# Altium schematic symbol library UCP.SchLib: 378 symbols (part 12 of 14)
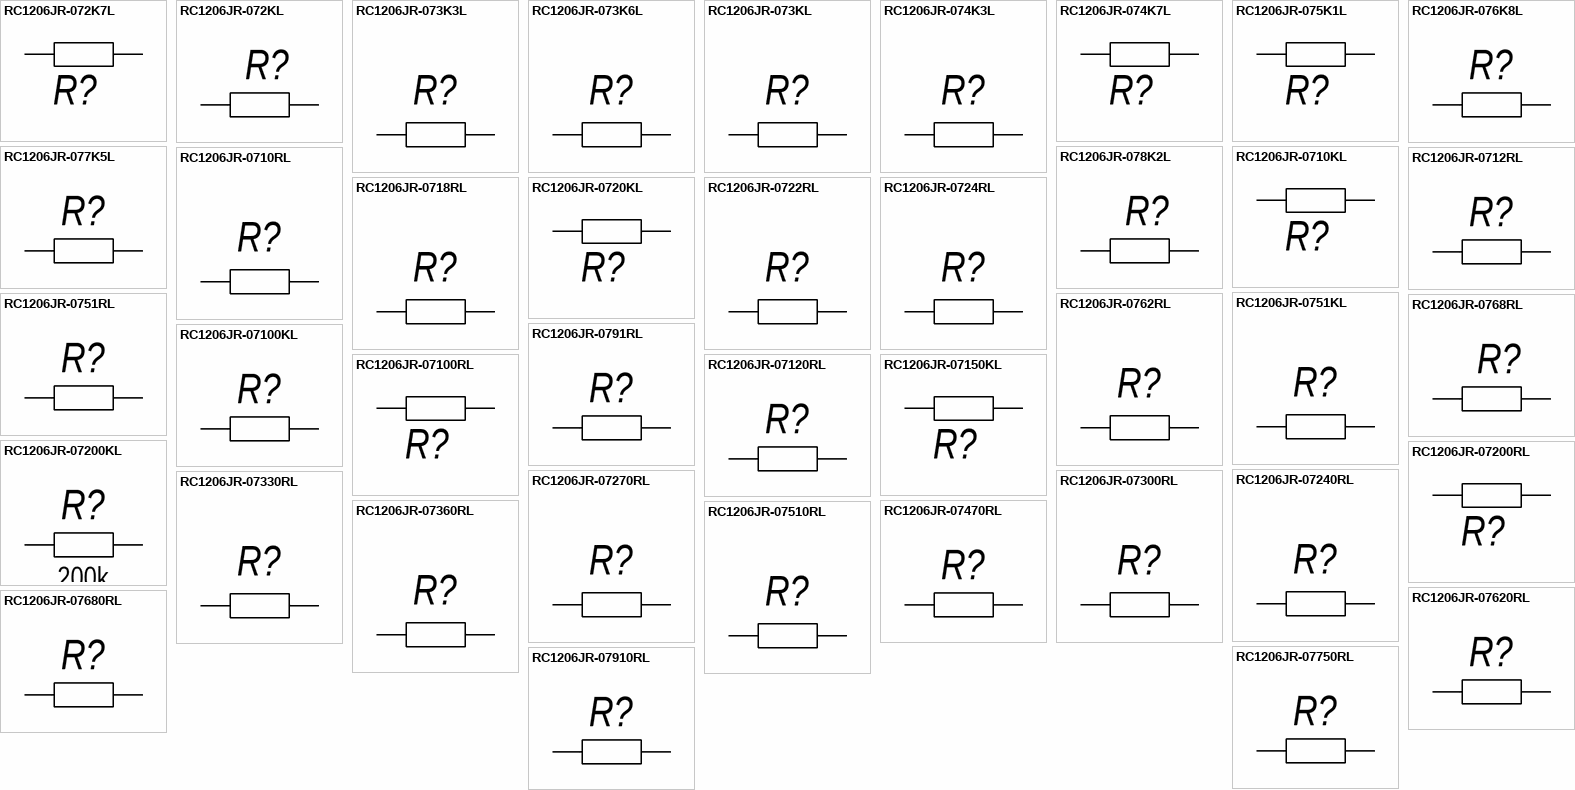
[diagram p35: symbols RC1206JR-072K7L to RC1206JR-07910RL]

## RC1206JR-07620RL
designator R?  (value not drawn)
Chip Resistor Surface Mount 1206 620 Ом; Tolerance: 5%; Resistance: 620R; Temperature Coefficient: 100ppm/°C; Power Rating: 250mW; Voltage Rating: 200V; Value: 620; Manufacturer 2: Yageo; Manufacturer Part Number 2: RC1206JR-07680RL; RoHS: Yes; Category: Chip SMD Resistors; Stock 2: 45000; Pricing 2: 1=0,01400, 5000=0,01400 (USD); Case/Package: 1206; Case Code (Metric): 3216; Case Code (Imperial): 1206; Size Code: 1206; Min Operating Temperature: -55°C; Max Operating Temperature: 155°C; Resistor Type: Thick Film; Packaging: Tape and Reel; Package Quantity: 1; Number of Terminations: 2; Termination: SMD/SMT; Max Power Dissipation: 250mW; Features: Moisture Resistant; Series: RC; Construction: Rectangular; Resistance Tolerance: 5%; Length: 0.122inch; Width: 0.063inch; Height: 0.026inch; Depth: 1.6mm; REACH SVHC: Unknown; Lead Free: Lead Free; Military Standard: Not; RoHS Compliant: Yes; ComponentLink1URL: https://datasheet.ciiva.com/29181/402524-da-01-en-smd-widerstand-chip1206-680-ohm-29181458.pdf?src-supplier=Conrad; ComponentLink1Description: https://datasheet.ciiva.com/29181/402524-da-01-en-smd-widerstand-chip1206-680-ohm-29181458.pdf?src-supplier=Conrad; ComponentLink2URL: https://datasheet.ciiva.com/7857/444357-7857525.pdf?src-supplier=Element14; ComponentLink2Description: https://datasheet.ciiva.com/7857/444357-7857525.pdf?src-supplier=Element14; ComponentLink3URL: https://datasheet.ciiva.com/7857/444357-7857526.pdf?src-supplier=Element14; ComponentLink3Description: https://datasheet.ciiva.com/7857/444357-7857526.pdf?src-supplier=Element14; ComponentLink4URL: https://datasheet.ciiva.com/17045/pyu-rc1206-51-rohs-l-4-17045767.pdf?src-supplier=Future+Electronics; ComponentLink4Description: https://datasheet.ciiva.com/17045/pyu-rc1206-51-rohs-l-4-17045767.pdf?src-supplier=Future+Electronics; ComponentLink5URL: https://datasheet.ciiva.com/2458/pyu-r-int-thick-7-2458809.pdf?src-supplier=Digi-Key; ComponentLink5Description: https://datasheet.ciiva.com/2458/pyu-r-int-thick-7-2458809.pdf?src-supplier=Digi-Key; ComponentLink6URL: https://datasheet.ciiva.com/2458/pyu-r-int-thick-7-2458810.pdf?src-supplier=Digi-Key; ComponentLink6Description: https://datasheet.ciiva.com/2458/pyu-r-int-thick-7-2458810.pdf?src-supplier=Digi-Key; ComponentLink7URL: https://datasheet.ciiva.com/2458/pyu-r-int-thick-7-2458811.pdf?src-supplier=Digi-Key; ComponentLink7Description: https://datasheet.ciiva.com/2458/pyu-r-int-thick-7-2458811.pdf?src-supplier=Digi-Key; Supplier 1: Digi-Key; Mount: SMT; Type: Резистор
footprint RESC310X160X65L40N (Resistor, Chip; 3.10 mm L X 1.60 mm W X 0.65 mm H body)
pins: 1, 2

## RC1206JR-07680RL
designator R?  (value not drawn)
Chip Resistor Surface Mount 1206 680 Ом; Tolerance: 5%; Resistance: 680R; Temperature Coefficient: 100ppm/°C; Power Rating: 250mW; Voltage Rating: 200V; Value: 680; Supplier 1: Digi-Key; Supplier Part Number 1: 311-680ERCT-ND; Supplier 2: Newark; Manufacturer 2: Yageo; Manufacturer Part Number 2: RC1206JR-07680RL; RoHS: Yes; Category: Chip SMD Resistors; Stock 2: 45000; Pricing 2: 1=0,01400, 5000=0,01400 (USD); Case/Package: 1206; Case Code (Metric): 3216; Case Code (Imperial): 1206; Size Code: 1206; Min Operating Temperature: -55°C; Max Operating Temperature: 155°C; Resistor Type: Thick Film; Packaging: Tape and Reel; Package Quantity: 1; Number of Terminations: 2; Termination: SMD/SMT; Max Power Dissipation: 250mW; Features: Moisture Resistant; Series: RC; Construction: Rectangular; Resistance Tolerance: 5%; Length: 0.122inch; Width: 0.063inch; Height: 0.026inch; Depth: 1.6mm; REACH SVHC: Unknown; Lead Free: Lead Free; Military Standard: Not; RoHS Compliant: Yes; ComponentLink1URL: https://datasheet.ciiva.com/29181/402524-da-01-en-smd-widerstand-chip1206-680-ohm-29181458.pdf?src-supplier=Conrad; ComponentLink1Description: https://datasheet.ciiva.com/29181/402524-da-01-en-smd-widerstand-chip1206-680-ohm-29181458.pdf?src-supplier=Conrad; ComponentLink2URL: https://datasheet.ciiva.com/7857/444357-7857525.pdf?src-supplier=Element14; ComponentLink2Description: https://datasheet.ciiva.com/7857/444357-7857525.pdf?src-supplier=Element14; ComponentLink3URL: https://datasheet.ciiva.com/7857/444357-7857526.pdf?src-supplier=Element14; ComponentLink3Description: https://datasheet.ciiva.com/7857/444357-7857526.pdf?src-supplier=Element14; ComponentLink4URL: https://datasheet.ciiva.com/17045/pyu-rc1206-51-rohs-l-4-17045767.pdf?src-supplier=Future+Electronics; ComponentLink4Description: https://datasheet.ciiva.com/17045/pyu-rc1206-51-rohs-l-4-17045767.pdf?src-supplier=Future+Electronics; ComponentLink5URL: https://datasheet.ciiva.com/2458/pyu-r-int-thick-7-2458809.pdf?src-supplier=Digi-Key; ComponentLink5Description: https://datasheet.ciiva.com/2458/pyu-r-int-thick-7-2458809.pdf?src-supplier=Digi-Key; ComponentLink6URL: https://datasheet.ciiva.com/2458/pyu-r-int-thick-7-2458810.pdf?src-supplier=Digi-Key; ComponentLink6Description: https://datasheet.ciiva.com/2458/pyu-r-int-thick-7-2458810.pdf?src-supplier=Digi-Key; ComponentLink7URL: https://datasheet.ciiva.com/2458/pyu-r-int-thick-7-2458811.pdf?src-supplier=Digi-Key; ComponentLink7Description: https://datasheet.ciiva.com/2458/pyu-r-int-thick-7-2458811.pdf?src-supplier=Digi-Key; Supplier Part Number 2: 12AC2296; Mount: SMT; Type: Резистор
footprint RESC310X160X65L40N (Resistor, Chip; 3.10 mm L X 1.60 mm W X 0.65 mm H body)
pins: 1, 2

## RC1206JR-07750RL
designator R?  (value not drawn)
Res Thick Film 1206 750 Ohm 5% 0.25W(1/4W) ±100ppm/°C Pad SMD T/R; Manufacturer 1: Yageo; Resistance: 680R; Power Rating: 250mW; Voltage Rating: 200V; Value: 750; Manufacturer 2: Yageo; Manufacturer Part Number 2: RC1206JR-07680RL; RoHS: Yes; Category: Chip SMD Resistors; Stock 2: 45000; Pricing 2: 1=0,01400, 5000=0,01400 (USD); Case/Package: 1206; Case Code (Metric): 3216; Case Code (Imperial): 1206; Size Code: 1206; Min Operating Temperature: -55°C; Max Operating Temperature: 155°C; Resistor Type: Thick Film; Tolerance: 5%; Temperature Coefficient: 100ppm/°C; Packaging: Tape and Reel; Package Quantity: 1; Number of Terminations: 2; Termination: SMD/SMT; Max Power Dissipation: 250mW; Features: Moisture Resistant; Series: RC; Construction: Rectangular; Resistance Tolerance: 5%; Length: 0.122inch; Width: 0.063inch; Height: 0.026inch; Depth: 1.6mm; REACH SVHC: Unknown; Lead Free: Lead Free; Military Standard: Not; RoHS Compliant: Yes; ComponentLink1URL: https://datasheet.ciiva.com/29181/402524-da-01-en-smd-widerstand-chip1206-680-ohm-29181458.pdf?src-supplier=Conrad; ComponentLink1Description: https://datasheet.ciiva.com/29181/402524-da-01-en-smd-widerstand-chip1206-680-ohm-29181458.pdf?src-supplier=Conrad; ComponentLink2URL: https://datasheet.ciiva.com/7857/444357-7857525.pdf?src-supplier=Element14; ComponentLink2Description: https://datasheet.ciiva.com/7857/444357-7857525.pdf?src-supplier=Element14; ComponentLink3URL: https://datasheet.ciiva.com/7857/444357-7857526.pdf?src-supplier=Element14; ComponentLink3Description: https://datasheet.ciiva.com/7857/444357-7857526.pdf?src-supplier=Element14; ComponentLink4URL: https://datasheet.ciiva.com/17045/pyu-rc1206-51-rohs-l-4-17045767.pdf?src-supplier=Future+Electronics; ComponentLink4Description: https://datasheet.ciiva.com/17045/pyu-rc1206-51-rohs-l-4-17045767.pdf?src-supplier=Future+Electronics; ComponentLink5URL: https://datasheet.ciiva.com/2458/pyu-r-int-thick-7-2458809.pdf?src-supplier=Digi-Key; ComponentLink5Description: https://datasheet.ciiva.com/2458/pyu-r-int-thick-7-2458809.pdf?src-supplier=Digi-Key; ComponentLink6URL: https://datasheet.ciiva.com/2458/pyu-r-int-thick-7-2458810.pdf?src-supplier=Digi-Key; ComponentLink6Description: https://datasheet.ciiva.com/2458/pyu-r-int-thick-7-2458810.pdf?src-supplier=Digi-Key; ComponentLink7URL: https://datasheet.ciiva.com/2458/pyu-r-int-thick-7-2458811.pdf?src-supplier=Digi-Key; ComponentLink7Description: https://datasheet.ciiva.com/2458/pyu-r-int-thick-7-2458811.pdf?src-supplier=Digi-Key; Supplier 1: Digi-Key; Manufacturer Part Number 1: RC1206JR-07750RL; Stock 1: 49; Pricing 1: 1=0,10000, 10=0,06300, 100=0,02580, 1000=0,01158, 2500=0,01005 (USD); Voltage Rating (DC): 200V; ComponentLink8URL: https://datasheet.ciiva.com/2520/pyu-r-int-thick-7-2520683.pdf?src-supplier=Digi-Key; ComponentLink8Description: https://datasheet.ciiva.com/2520/pyu-r-int-thick-7-2520683.pdf?src-supplier=Digi-Key; ComponentLink9URL: https://datasheet.ciiva.com/2520/pyu-r-int-thick-7-2520684.pdf?src-supplier=Digi-Key; ComponentLink9Description: https://datasheet.ciiva.com/2520/pyu-r-int-thick-7-2520684.pdf?src-supplier=Digi-Key; ComponentLink10URL: https://datasheet.ciiva.com/2520/pyu-r-int-thick-7-2520685.pdf?src-supplier=Digi-Key; ComponentLink10Description: https://datasheet.ciiva.com/2520/pyu-r-int-thick-7-2520685.pdf?src-supplier=Digi-Key; Supplier Part Number 1: 311-750ERCT-ND; Mount: SMT; Type: Резистор
footprint RESC310X160X65L40N (Resistor, Chip; 3.10 mm L X 1.60 mm W X 0.65 mm H body)
pins: 1, 2

## RC1206JR-07910RL
designator R?  (value not drawn)
Chip Resistor Surface Mount 1206 910 Ом; Tolerance: 5%; Resistance: 680R; Temperature Coefficient: 100ppm/°C; Power Rating: 250mW; Voltage Rating: 200V; Value: 910; Supplier 1: Digi-Key; Supplier Part Number 1: 311-680ERCT-ND; Supplier 2: Newark; Manufacturer 2: Yageo; Manufacturer Part Number 2: RC1206JR-07680RL; RoHS: Yes; Category: Chip SMD Resistors; Stock 2: 45000; Pricing 2: 1=0,01400, 5000=0,01400 (USD); Case/Package: 1206; Case Code (Metric): 3216; Case Code (Imperial): 1206; Size Code: 1206; Min Operating Temperature: -55°C; Max Operating Temperature: 155°C; Resistor Type: Thick Film; Packaging: Tape and Reel; Package Quantity: 1; Number of Terminations: 2; Termination: SMD/SMT; Max Power Dissipation: 250mW; Features: Moisture Resistant; Series: RC; Construction: Rectangular; Resistance Tolerance: 5%; Length: 0.122inch; Width: 0.063inch; Height: 0.026inch; Depth: 1.6mm; REACH SVHC: Unknown; Lead Free: Lead Free; Military Standard: Not; RoHS Compliant: Yes; ComponentLink1URL: https://datasheet.ciiva.com/29181/402524-da-01-en-smd-widerstand-chip1206-680-ohm-29181458.pdf?src-supplier=Conrad; ComponentLink1Description: https://datasheet.ciiva.com/29181/402524-da-01-en-smd-widerstand-chip1206-680-ohm-29181458.pdf?src-supplier=Conrad; ComponentLink2URL: https://datasheet.ciiva.com/7857/444357-7857525.pdf?src-supplier=Element14; ComponentLink2Description: https://datasheet.ciiva.com/7857/444357-7857525.pdf?src-supplier=Element14; ComponentLink3URL: https://datasheet.ciiva.com/7857/444357-7857526.pdf?src-supplier=Element14; ComponentLink3Description: https://datasheet.ciiva.com/7857/444357-7857526.pdf?src-supplier=Element14; ComponentLink4URL: https://datasheet.ciiva.com/17045/pyu-rc1206-51-rohs-l-4-17045767.pdf?src-supplier=Future+Electronics; ComponentLink4Description: https://datasheet.ciiva.com/17045/pyu-rc1206-51-rohs-l-4-17045767.pdf?src-supplier=Future+Electronics; ComponentLink5URL: https://datasheet.ciiva.com/2458/pyu-r-int-thick-7-2458809.pdf?src-supplier=Digi-Key; ComponentLink5Description: https://datasheet.ciiva.com/2458/pyu-r-int-thick-7-2458809.pdf?src-supplier=Digi-Key; ComponentLink6URL: https://datasheet.ciiva.com/2458/pyu-r-int-thick-7-2458810.pdf?src-supplier=Digi-Key; ComponentLink6Description: https://datasheet.ciiva.com/2458/pyu-r-int-thick-7-2458810.pdf?src-supplier=Digi-Key; ComponentLink7URL: https://datasheet.ciiva.com/2458/pyu-r-int-thick-7-2458811.pdf?src-supplier=Digi-Key; ComponentLink7Description: https://datasheet.ciiva.com/2458/pyu-r-int-thick-7-2458811.pdf?src-supplier=Digi-Key; Supplier Part Number 2: 12AC2296; Mount: SMT; Type: Резистор
footprint RESC310X160X65L40N (Resistor, Chip; 3.10 mm L X 1.60 mm W X 0.65 mm H body)
pins: 1, 2

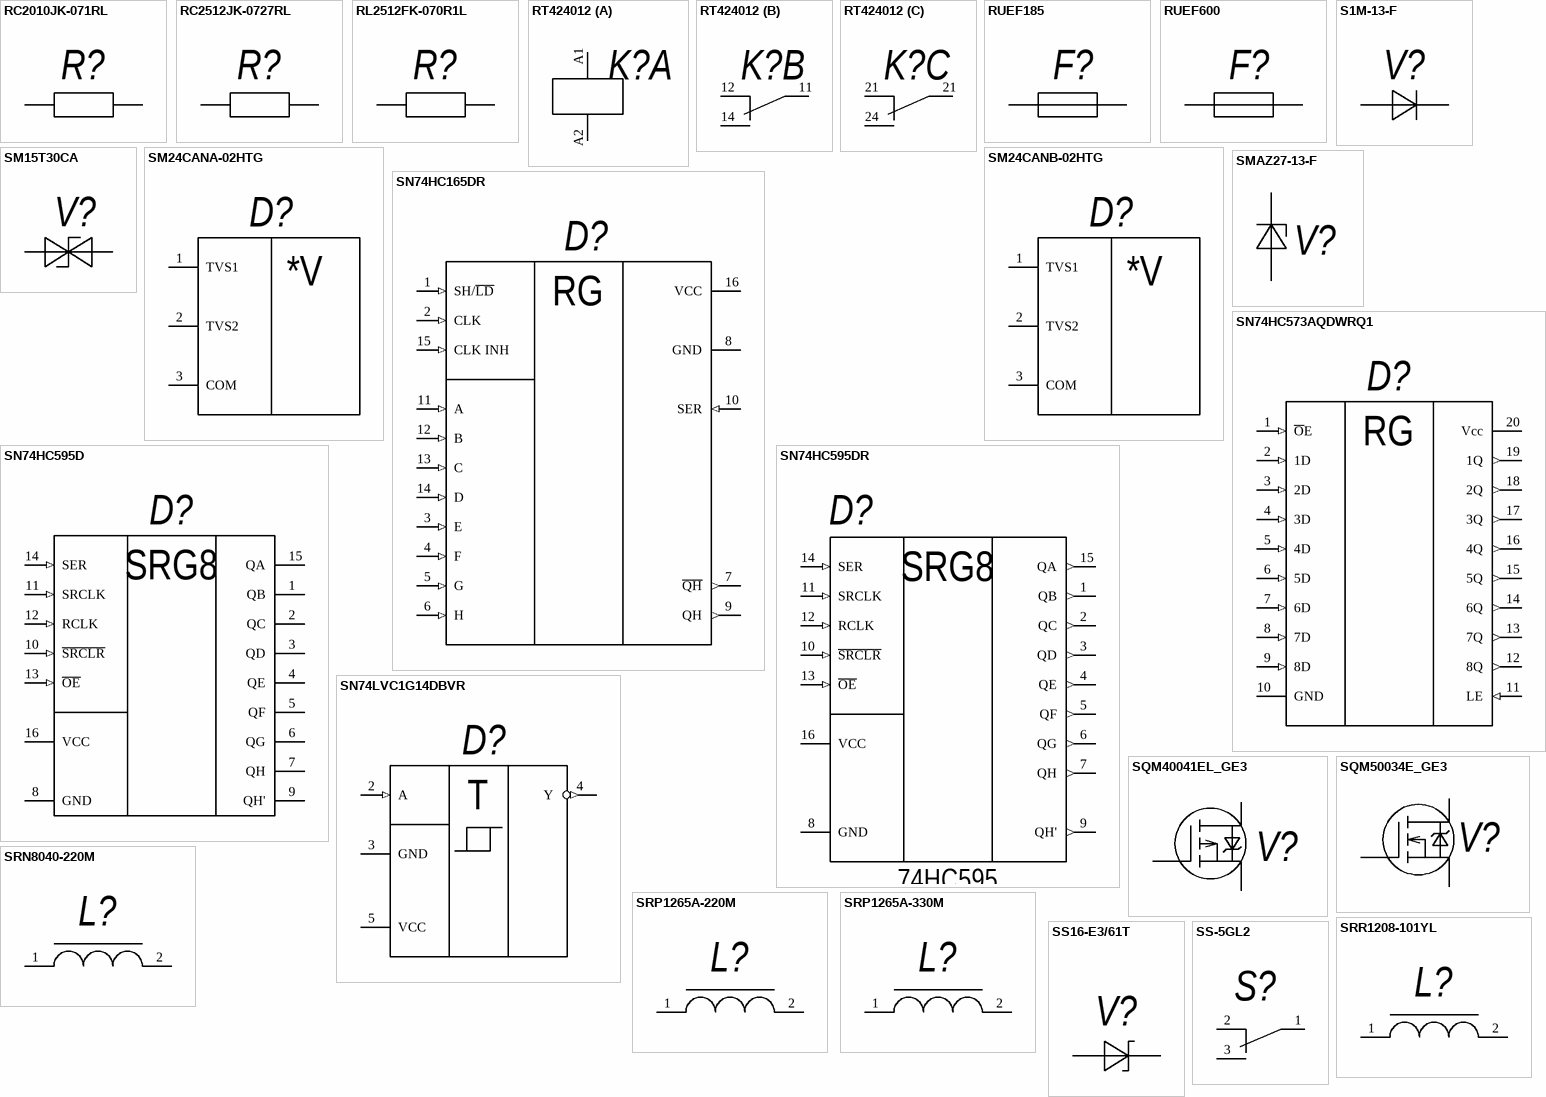
[diagram p20: symbols RC2010JK-071RL to SS-5GL2]

## RC2010JK-071RL
designator R?  (value not drawn)
Res Thick Film 2010 1 Ohm 5% 3/4W ±200ppm/°C Molded SMD SMD Embossed T/R; Manufacturer 1: Yageo; Resistance: 1R; Power Rating: 750mW; Voltage Rating: 200V; Value: 1; Supplier 1: Digi-Key; Supplier Part Number 1: 13-RC2010JK-071RLCT-ND; Manufacturer Part Number 1: RC2010JK-071RL; RoHS: Yes; Description 1: Res Thick Film 2010 1 Ohm 5% 3/4W ±200ppm/°C Molded SMD SMD Embossed T/R; Category: Chip SMD Resistors; Stock 1: 79; Pricing 1: 1=0,43000, 10=0,36800, 100=0,14370, 1000=0,06015 (USD); Case/Package: 2010; Contact Plating: Tin,Matte; Case Code (Imperial): 2010; Case Code (Metric): 5025; Size Code: 2010; Min Operating Temperature: -55°C; Max Operating Temperature: 155°C; Tolerance: 5%; Resistor Type: Thick Film; Temperature Coefficient: 200ppm/°C; Packaging: Tape and Reel; Termination: SMD/SMT; Number of Terminations: 2; Max Power Dissipation: 750mW; Features: Moisture Resistant; Series: RC; Construction: Rectangular; Length: 0.197inch; Width: 0.098inch; Height: 0.026inch; Depth: 2.5mm; Radiation Hardening: No; Military Standard: Not; Lead Free: Lead Free; RoHS Compliant: Yes; ComponentLink1URL: https://datasheet.ciiva.com/16873/pyu-rc2010-51-rohs-l-4-16873159.pdf?src-supplier=Avnet+Europe; ComponentLink1Description: https://datasheet.ciiva.com/16873/pyu-rc2010-51-rohs-l-4-16873159.pdf?src-supplier=Avnet+Europe; ComponentLink2URL: https://datasheet.ciiva.com/28419/pyu-rc2010-51-rohs-l-4-28419451.pdf?src-supplier=Avnet+Europe; ComponentLink2Description: https://datasheet.ciiva.com/28419/pyu-rc2010-51-rohs-l-4-28419451.pdf?src-supplier=Avnet+Europe; Mount: SMT; Type: Резистор
footprint RESC500X250X65L50N (Resistor, Chip; 5.00mm L X 2.50 mm W X 0.65 mm H body)
pins: 1, 2

## RC2512JK-0727RL
designator R?  (value not drawn)
Chip Resistor 27Ω ± 5% 1W ± 600ppm/℃ 2512; Manufacturer 1: Yageo; Manufacturer Part Number 1: RL2512FK-070R1L; Resistance: 100mR; Voltage Rating: 500V; Temperature Coefficient: 600ppm/°C; Resistance Tolerance: 1%; Value: 27; Supplier 1: RSComponents; Supplier Part Number 1: 1996130P; RoHS: Yes; Category: Chip SMD Resistors; Stock 1: 3650; Pricing 1: 100=0,37100, 250=0,33900, 500=0,31500, 1000=0,27100 (GBP); Case/Package: 2512; Case Code (Imperial): 2512; Case Code (Metric): 6432; Contact Plating: Tin,Lead; Size Code: 2512; Min Operating Temperature: -55°C; Max Operating Temperature: 155°C; Power Rating: 1W; Tolerance: 5%; Packaging: Tape and Reel; Package Quantity: 4000; Termination: SMD/SMT; Resistor Type: Thick Film; Number of Terminations: 2; Max Power Dissipation: 1W; Features: Moisture Resistant; Series: RL; Length: 0.25inch; Width: 0.126inch; Height: 0.026inch; REACH SVHC: Unknown; Lead Free: Lead Free; RoHS Compliant: Yes; ComponentLink1URL: https://datasheet.ciiva.com/22698/1747499-22698992.pdf?src-supplier=Element14; ComponentLink1Description: https://datasheet.ciiva.com/22698/1747499-22698992.pdf?src-supplier=Element14; ComponentLink2URL: https://datasheet.ciiva.com/5558/pyu-rl-521-rohs-l-5-5558076.pdf?src-supplier=Mouser; ComponentLink2Description: https://datasheet.ciiva.com/5558/pyu-rl-521-rohs-l-5-5558076.pdf?src-supplier=Mouser; Mount: SMT; Type: Резистор; Supplier 2: Farnell; Supplier Part Number 2: 3496427; Manufacturer 2: Yageo; Manufacturer Part Number 2: RC2512JK-0727RL; RoHS 2: Yes; Stock 2: 1828; Pricing 2: 10=0,294, 100=0,109, 500=0,076, 1000=0,043, 2000=0,039, 4000=0,0382, 20000=0,0374, 40000=0,0367 (EUR); ComponentLink3URL: https://datasheet.ciiva.com/17420/pyu-rc2512-51-rohs-l-4-17420638.pdf?src-supplier=Future+Electronics; ComponentLink3Description: https://datasheet.ciiva.com/17420/pyu-rc2512-51-rohs-l-4-17420638.pdf?src-supplier=Future+Electronics; ComponentLink4URL: https://datasheet.ciiva.com/12656/pyu-rc2512-51-rohs-l-4-12656902.pdf?src-supplier=Mouser; ComponentLink4Description: https://datasheet.ciiva.com/12656/pyu-rc2512-51-rohs-l-4-12656902.pdf?src-supplier=Mouser
footprint RESC635X320X65L50N (Resistor, Chip; 6.35 mm L X 3.20 mm W X 0.65 mm H body)
pins: 1, 2

## RL2512FK-070R1L
designator R?  (value not drawn)
Chip Resistor 0.1Ω ± 1.00% 1W ± 600ppm/℃ 2512; Manufacturer 1: Yageo; Resistance: 100mR; Tolerance: 5%; Voltage Rating: 500V; Temperature Coefficient: 600ppm/°C; Resistance Tolerance: 1%; Value: 0,1; Supplier 1: RSComponents; Supplier Part Number 1: 1996130P; Manufacturer Part Number 1: RL2512FK-070R1L; RoHS: Yes; Category: Chip SMD Resistors; Stock 1: 3650; Pricing 1: 100=0,37100, 250=0,33900, 500=0,31500, 1000=0,27100 (GBP); Case/Package: 2512; Case Code (Imperial): 2512; Case Code (Metric): 6432; Contact Plating: Tin,Lead; Size Code: 2512; Min Operating Temperature: -55°C; Max Operating Temperature: 155°C; Power Rating: 1W; Packaging: Tape and Reel; Package Quantity: 4000; Termination: SMD/SMT; Resistor Type: Thick Film; Number of Terminations: 2; Max Power Dissipation: 1W; Features: Moisture Resistant; Series: RL; Length: 0.25inch; Width: 0.126inch; Height: 0.026inch; REACH SVHC: Unknown; Lead Free: Lead Free; RoHS Compliant: Yes; ComponentLink1URL: https://datasheet.ciiva.com/22698/1747499-22698992.pdf?src-supplier=Element14; ComponentLink1Description: https://datasheet.ciiva.com/22698/1747499-22698992.pdf?src-supplier=Element14; ComponentLink2URL: https://datasheet.ciiva.com/5558/pyu-rl-521-rohs-l-5-5558076.pdf?src-supplier=Mouser; ComponentLink2Description: https://datasheet.ciiva.com/5558/pyu-rl-521-rohs-l-5-5558076.pdf?src-supplier=Mouser; Mount: SMT; Type: Резистор
footprint RESC635X320X65L50N (Resistor, Chip; 6.35 mm L X 3.20 mm W X 0.65 mm H body)
pins: 1, 2

## RT424012
designator K?  (value not drawn)
RT2 Series 8 A DPDT 12 VDC PCB Mount Miniature General Purpose Power Relay; Manufacturer 1: Panasonic; Manufacturer Part Number 1: TX2-12V-TH; Coil Current: 11.7mA; Coil Resistance: 1.028kR; Coil Voltage (DC): 12V; Max Current Rating: 7.5A; Max Voltage Rating (DC): 220V; Coil Type: Non-Latching; Contact Current Rating: 2A; Operate Time: 4ms; Coil Power: 140mW; Max Voltage Rating (AC): 250V; Supplier 1: Mouser; Supplier Part Number 1: 769-TX2-12V-TH; RoHS: Yes; Category: Signal Relays; Stock 1: 5; Pricing 1: 1=4,00000, 10=3,76000, 25=3,34000, 50=3,34000, 100=3,34000, 120=3,18000, 280=3,01000, 520=2,68000, 1000=2,36000, 5000=2,26000, 10000=2,36000 (USD); Mount: THT; Case/Package: DIP-8; Number of Pins: 8; Contact Material: Gold,Silver; Weight: 2g; Min Operating Temperature: -40°C; Max Operating Temperature: 85°C; Package Quantity: 40; Packaging: Rail/Tube; Throw Configuration: DPDT; Termination: PC Pin; Release Time: 4ms; Relay Type: General Purpose; Series: TX-TH; Voltage Rating (AC): 250V; Length: 15mm; Depth: 7.4mm; Lead Free: Lead Free; RoHS Compliant: Yes; ComponentLink1URL: https://datasheet.ciiva.com/2413/tx-relays-th-type-2413250.pdf?src-supplier=Digi-Key; ComponentLink1Description: https://datasheet.ciiva.com/2413/tx-relays-th-type-2413250.pdf?src-supplier=Digi-Key; Supplier 2: RSComponents; Supplier Part Number 2: 6803830P; Manufacturer 2: TE Connectivity; Manufacturer Part Number 2: 6-1393243-3; RoHS 2: Yes; Stock 2: 18223; Pricing 2: 10=3,41000, 25=3,23000, 50=3,05000, 100=2,87000 (GBP); ComponentLink2URL: https://datasheet.ciiva.com/29119/504280-da-01-en-leist-pr-rel-2uk-12vdc-8a-rt2-29119389.pdf?src-supplier=Conrad; ComponentLink2Description: https://datasheet.ciiva.com/29119/504280-da-01-en-leist-pr-rel-2uk-12vdc-8a-rt2-29119389.pdf?src-supplier=Conrad; ComponentLink3URL: https://datasheet.ciiva.com/16400/eng-ds-rt2-0511-16400597.pdf?src-supplier=Future+Electronics; ComponentLink3Description: https://datasheet.ciiva.com/16400/eng-ds-rt2-0511-16400597.pdf?src-supplier=Future+Electronics; ComponentLink4URL: https://datasheet.ciiva.com/2406/eng-ds-rt2-1014-2406783.pdf?src-supplier=Digi-Key; ComponentLink4Description: https://datasheet.ciiva.com/2406/eng-ds-rt2-1014-2406783.pdf?src-supplier=Digi-Key; ComponentLink5URL: https://datasheet.ciiva.com/30055/eng-ds-rt2-0511-30055769.pdf?src-supplier=Onlinecomponents.com; ComponentLink5Description: https://datasheet.ciiva.com/30055/eng-ds-rt2-0511-30055769.pdf?src-supplier=Onlinecomponents.com; ComponentLink6URL: https://datasheet.ciiva.com/7999/1717885-7999127.pdf?src-supplier=Element14; ComponentLink6Description: https://datasheet.ciiva.com/7999/1717885-7999127.pdf?src-supplier=Element14; Type: Реле; Value: RT424012
footprint TE_6-1393243-3 (RT424012)
part A pins: A1 A2 "Вывод обмотки", A2 "Вывод обмотки"
part B pins: 11 "CO Group 1", 12 "NC Goup 1", 14 "NO Group 1"
part C pins: 21 "NC Group 2", 21 "CO Group 2", 24 "NO Group 2"

## RUEF185
designator F?  (value not drawn)
PTC Resettable Fuse 1.85A(hold) 3.7A(trip) 30V 100A 1W 8.7s 0.03Ohm Radial 10.2 X 3 X 15.7mm Bag; Type: Предохранитель самовостанавливающийся; Manufacturer 2: Littelfuse; Manufacturer Part Number 2: RUEF185; RoHS: Yes; Category: PTC Resettable Fuses; Stock 2: 4240; Pricing 2: 10=0,49000, 100=0,38500, 500=0,37400, 1500=0,36400, 2500=0,35400 (USD); Case/Package: DIP-2; Min Operating Temperature: -40°C; Max Operating Temperature: 85°C; Hold Current: 1.85A; Voltage Rating (DC): 30V; RoHS Compliant: Yes; Lead Free: Lead Free; REACH SVHC: Unknown; ComponentLink1URL: http://www.farnell.com/datasheets/1482689.pdf?src-supplier=Farnell; ComponentLink1Description: http://www.farnell.com/datasheets/1482689.pdf?src-supplier=Farnell; ComponentLink2URL: http://www.farnell.com/datasheets/1482689.pdf?src-supplier=Newark; ComponentLink2Description: http://www.farnell.com/datasheets/1482689.pdf?src-supplier=Newark; ComponentLink3URL: http://www.farnell.com/datasheets/1482689.pdf?src-supplier=Element14; ComponentLink3Description: http://www.farnell.com/datasheets/1482689.pdf?src-supplier=Element14; ComponentLink4URL: https://www.littelfuse.com/~/media/electronics/datasheets/resettable_ptcs/littelfuse_ptc_radial_leaded_ruef_datasheet.pdf.pdf?src-supplier=Digi-Key; ComponentLink4Description: https://www.littelfuse.com/~/media/electronics/datasheets/resettable_ptcs/littelfuse_ptc_radial_leaded_ruef_datasheet.pdf.pdf?src-supplier=Digi-Key; Supplier 1: RSComponents; Supplier Part Number 1: 5176809; Mount: THT; Value: RUEF185
footprint THRMSBO510W51L1020T300H1570
pins: 1, 2

## RUEF600
designator F?  (value not drawn)
PTC Resettable Fuse 6A(hold) 12A(trip) 30V 100A 3.5W 16s 0.005Ohm Radial 16.5 X 3 X 24.1mm Bag; Manufacturer 1: TE Connectivity; Number of Terminals/Pins: 2; Body Material: Polymer,Epoxy; Resistance: 40mR; Lead Length: 7.6mm; Wire/Cable Diameter: 0.81mm; Body Length: 16.5mm; Approvals: UL,CSA,TUV; Type: Предохранитель самовостанавливающийся; Supplier 1: Avnet; Supplier Part Number 1: RUEF600; Manufacturer Part Number 1: RUEF600; RoHS: Yes; Category: PTC Resettable Fuses; Pricing 1: 1=0,33512, 10=0,32568, 30=0,31624, 50=0,30680, 100=0,29736, 250=0,28792, 500=0,27848 (USD); Mount: THT; Case/Package: DIP-2; Number of Pins: 2; Min Operating Temperature: -40°C; Max Operating Temperature: 85°C; Hold Current: 6A; Max Current Rating: 100A; Packaging: Bulk; Trip Current: 12A; Time to Trip: 16s; Power Dissipation: 3.5W; Voltage Rating (DC): 30V; Package Quantity: 250; Operating Supply Voltage: 30V; Current Rating: 100A; Series: RUEF; Termination: Radial; Working Voltage: 30V; Voltage Rating: 30V; Voltage Rating (AC): 30V; Width: 16.5mm; Height: 24.9mm; Lead Pitch: 10.9mm; Thickness: 3mm; Size: 24.1mm; Body Height: 24.1mm; Radiation Hardening: No; RoHS Compliant: Yes; ELV: Compliant; Lead Free: Lead Free; REACH SVHC: No SVHC; Flammability Rating: UL94 V-0; ComponentLink1URL: https://datasheet.ciiva.com/30563/rf2652-000-teconnectivitycircuitprotection-30563484.pdf?src-supplier=Onlinecomponents.com; ComponentLink1Description: https://datasheet.ciiva.com/30563/rf2652-000-teconnectivitycircuitprotection-30563484.pdf?src-supplier=Onlinecomponents.com; ComponentLink2URL: https://datasheet.ciiva.com/17485/ruef600-17485016.pdf?src-supplier=Future+Electronics; ComponentLink2Description: https://datasheet.ciiva.com/17485/ruef600-17485016.pdf?src-supplier=Future+Electronics; ComponentLink3URL: https://datasheet.ciiva.com/23817/1482689-23817982.pdf?src-supplier=Newark; ComponentLink3Description: https://datasheet.ciiva.com/23817/1482689-23817982.pdf?src-supplier=Newark; ComponentLink4URL: https://datasheet.ciiva.com/1275/1482689-1275197.pdf?src-supplier=Element14; ComponentLink4Description: https://datasheet.ciiva.com/1275/1482689-1275197.pdf?src-supplier=Element14; ComponentLink5URL: https://datasheet.ciiva.com/14540/70059842-14540119.pdf?src-supplier=Allied+Electronics; ComponentLink5Description: https://datasheet.ciiva.com/14540/70059842-14540119.pdf?src-supplier=Allied+Electronics; ComponentLink6URL: https://datasheet.ciiva.com/14303/eng-cs-radial-leaded-a-14303469.pdf?src-supplier=Avnet; ComponentLink6Description: https://datasheet.ciiva.com/14303/eng-cs-radial-leaded-a-14303469.pdf?src-supplier=Avnet; Value: RUEF600
footprint THRMSBO1020W82L1650T300H2410
footprint THRMSBO1020W82L1650T300H2410_HORIZONT
pins: 1, 2

## S1M-13-F
designator V?  (value not drawn)
DIODE GEN PURP 1KV 1A SMA; Manufacturer 1: Diodes; Reverse Recovery Time: 3us; Forward Voltage: 1.1V; Max Reverse Current: 5uA; Peak Non-Repetitive Surge Current: 30A; Polarity: Standard; Capacitance: 10pF; Recovery Time: 1.8us; Value: S1; Supplier 1: Digi-Key; Manufacturer Part Number 1: S1M-13-F; RoHS: Yes; Category: Rectifier Diodes; Stock 1: 230589; Pricing 1: 1=0,27000, 10=0,22300, 100=0,11850, 500=0,07796, 1000=0,05301, 2000=0,04782 (USD); Case/Package: SMA(DO-214AC); Number of Pins: 2; Weight: 0.002258oz; Min Operating Temperature: -65°C; Max Operating Temperature: 150°C; Forward Current: 1A; Max Repetitive Reverse Voltage (Vrrm): 1kV; Packaging: Tape and Reel; Max Forward Surge Current (Ifsm): 30A; Voltage Rating (DC): 1kV; Current Rating: 1A; Output Current: 1A; Package Quantity: 5000; Reverse Voltage (DC): 1kV; Average Rectified Current: 1A; Max Reverse Voltage (DC): 1kV; Termination: SMD/SMT; Series: -; Length: 4.6mm; Width: 2.92mm; Height: 2.1mm; Radiation Hardening: No; REACH SVHC: No SVHC; Lead Free: Lead Free; RoHS Compliant: Yes; ComponentLink1URL: https://datasheet.ciiva.com/34302/1541642-34302418.pdf?src-supplier=Jameco; ComponentLink1Description: https://datasheet.ciiva.com/34302/1541642-34302418.pdf?src-supplier=Jameco; ComponentLink2URL: https://datasheet.ciiva.com/22695/1911706-22695834.pdf?src-supplier=Element14; ComponentLink2Description: https://datasheet.ciiva.com/22695/1911706-22695834.pdf?src-supplier=Element14; Supplier Part Number 1: S1M-FDICT-ND; Mount: SMT; Type: Диод
footprint DIOM521X260X220L114X145N (Diode, Molded Body; 4.315 mm L X 2.605 mm W X 2.20 mm H body)
footprint DIOM521X266X229L114X145N (Diode, Molded Body; 4.315 mm L X 2.605 mm W X 2.29 mm H body)
pins: A, C

## SM15T30CA
designator V?  (value not drawn)
STMICROELECTRONICS - SM15T30CA - DIODE, TVS, 30V, 1.5KW; Clamping Voltage: 53.5V; Operating Supply Voltage: 25.6V; Max Surge Current: 1mA; Polarity: Bidirectional; Peak Pulse Current: 187A; Number of Elements: 1; Reverse Breakdown Voltage: 28.5V; Max Reverse Leakage Current: 200nA; Element Configuration: Single; Power Line Protection: No; Diode Type: ZENER; Max Breakdown Voltage: 31.5V; Capacitance: 2.9nF; Value: SM15; Supplier 1: RSComponents; Manufacturer 1: STMicroelectronics; Manufacturer Part Number 1: SM15T30CA; RoHS: Yes; Category: TVS Diodes; Stock 1: 1; Pricing 1: 5=1,06600, 10=0,88700, 100=0,61800, 500=0,54000, 1000=0,45900 (USD); Mount: SMT; Case/Package: SMC (DO-214AB); Number of Pins: 2; Min Operating Temperature: -55°C; Max Operating Temperature: 150°C; Peak Pulse Power: 1.5kW; Package Quantity: 1; Packaging: Tape and Reel; Breakdown Voltage: 30V; Reverse Standoff Voltage: 25.6V; Test Current: 1mA; Direction: Bidirectional; Min Breakdown Voltage: 28.5V; Leakage Current: 200nA; Termination: SMD/SMT; Number of Bidirectional Channels: 1; Resistor Type: Zener; Max Power Dissipation: 1.5kW; Series: SM15T, TRANSIL™; Power Dissipation: 1.5kW; Voltage Rating (DC): 30V; Clamping Voltage-Max: 53.5V; Length: 7.15mm; Width: 6.25mm; Height: 2.45mm; Radiation Hardening: No; RoHS Compliant: Yes; REACH SVHC: No SVHC; Lead Free: Lead Free; ComponentLink1URL: https://datasheet.ciiva.com/4508/cd00000724-241687-4508448.pdf?src-supplier=Mouser; ComponentLink1Description: https://datasheet.ciiva.com/4508/cd00000724-241687-4508448.pdf?src-supplier=Mouser; ComponentLink2URL: https://datasheet.ciiva.com/3022/cd00000724-3022039.pdf?src-supplier=Avnet; ComponentLink2Description: https://datasheet.ciiva.com/3022/cd00000724-3022039.pdf?src-supplier=Avnet; ComponentLink3URL: https://datasheet.ciiva.com/341/cd00000724-341945.pdf?src-supplier=Digi-Key; ComponentLink3Description: https://datasheet.ciiva.com/341/cd00000724-341945.pdf?src-supplier=Digi-Key; ComponentLink4URL: https://datasheet.ciiva.com/341/cd00000724-341946.pdf?src-supplier=Digi-Key; ComponentLink4Description: https://datasheet.ciiva.com/341/cd00000724-341946.pdf?src-supplier=Digi-Key; ComponentLink5URL: https://datasheet.ciiva.com/7662/1670952-7662138.pdf?src-supplier=Element14; ComponentLink5Description: https://datasheet.ciiva.com/7662/1670952-7662138.pdf?src-supplier=Element14; ComponentLink6URL: https://datasheet.ciiva.com/341/cd00000724-341947.pdf?src-supplier=Digi-Key; ComponentLink6Description: https://datasheet.ciiva.com/341/cd00000724-341947.pdf?src-supplier=Digi-Key; ComponentLink7URL: https://datasheet.ciiva.com/14161/sm15t-eng-tds-14161646.pdf?src-supplier=Distrelec; ComponentLink7Description: https://datasheet.ciiva.com/14161/sm15t-eng-tds-14161646.pdf?src-supplier=Distrelec; ComponentLink8URL: https://datasheet.ciiva.com/16487/cd00000724-16487150.pdf?src-supplier=Future+Electronics; ComponentLink8Description: https://datasheet.ciiva.com/16487/cd00000724-16487150.pdf?src-supplier=Future+Electronics; ComponentLink9URL: https://datasheet.ciiva.com/7973/1670952-7973359.pdf?src-supplier=Element14; ComponentLink9Description: https://datasheet.ciiva.com/7973/1670952-7973359.pdf?src-supplier=Element14; Supplier Part Number 1: 4861253; Type: Диод
footprint WE-TVSP_DO-214AB_Bidirectional (Power TVS Diode, 2-Leads. body 6.86x5.9mm)
pins: 1 A, 2 A

## SM24CANA-02HTG
designator D?  (value not drawn)
Series 200W TVS Diode Array; Type: Микросхема; Value: SM24; Supplier 1: Digi-Key; Supplier Part Number 1: F6449CT-ND; Case/Package: SOT-23-3; Mount: SMT
footprint SOT23-3P95_240X110L25X60N (Small Outline Transistor (SOT23), 0.95 mm pitch; 3 pin, 2.90 mm L X 1.30 mm W X 1.10 mm H body)
footprint SOT23-3P95_240X110L30X43N (Small Outline Transistor (SOT23), 0.95 mm pitch; 3 pin, 2.90 mm L X 1.30 mm W X 1.10 mm H body)
pins: 1 TVS1, 2 TVS2, 3 COM
text: *V

## SM24CANB-02HTG
designator D?  (value not drawn)
Series 500W TVS Diode Array; Type: Микросхема; Value: SM24; Supplier 1: Digi-Key; Supplier Part Number 1: F6707CT-ND; Case/Package: SOT-23-3; Mount: SMT
footprint SOT23-3P95_240X110L25X60N (Small Outline Transistor (SOT23), 0.95 mm pitch; 3 pin, 2.90 mm L X 1.30 mm W X 1.10 mm H body)
footprint SOT23-3P95_240X110L30X43N (Small Outline Transistor (SOT23), 0.95 mm pitch; 3 pin, 2.90 mm L X 1.30 mm W X 1.10 mm H body)
pins: 1 TVS1, 2 TVS2, 3 COM
text: *V

## SMAZ27-13-F
designator V?  (value not drawn)
1.0W SURFACE MOUNT ZENER DIODE; Manufacturer 1: Diodes; Max Reverse Leakage Current: 500nA; Zener Voltage: 27V; Element Configuration: Single; Tolerance: 5%; Forward Voltage: 1.2V; Impedance: 15R; Power Dissipation: 1W; Test Current: 25mA; Value: 0; Supplier 1: Digi-Key; Supplier Part Number 1: SMAZ27-FDICT-ND; Manufacturer Part Number 1: SMAZ27-13-F; RoHS: Yes; Category: Zener Diodes; Stock 1: 351; Pricing 1: 1=0,51000, 10=0,38800, 100=0,24160, 500=0,16530, 1000=0,12716, 2000=0,11445 (USD); Mount: SMT; Case/Package: SMA(DO-214AC); Number of Pins: 2; Weight: 0.002258oz; Min Operating Temperature: -65°C; Max Operating Temperature: 150°C; Package Quantity: 5000; Packaging: Tape and Reel; Voltage Tolerance: 5%; Zener Current: 500nA; Max Power Dissipation: 1W; Working Voltage: 27V; Max Reverse Current: 500nA; Power Rating: 1W; Voltage Rating (DC): 27V; Series: -; Length: 4.6mm; Width: 2.92mm; Height: 2.09mm; Radiation Hardening: No; Lead Free: Lead Free; RoHS Compliant: Yes; ComponentLink1URL: https://datasheet.ciiva.com/15141/getdatasheetpartid-28315-15141885.pdf?src-supplier=Verical; ComponentLink1Description: https://datasheet.ciiva.com/15141/getdatasheetpartid-28315-15141885.pdf?src-supplier=Verical; ComponentLink2URL: https://datasheet.ciiva.com/893/ds18015-893414.pdf?src-supplier=Digi-Key; ComponentLink2Description: https://datasheet.ciiva.com/893/ds18015-893414.pdf?src-supplier=Digi-Key; ComponentLink3URL: https://datasheet.ciiva.com/893/ds18015-893415.pdf?src-supplier=Digi-Key; ComponentLink3Description: https://datasheet.ciiva.com/893/ds18015-893415.pdf?src-supplier=Digi-Key; ComponentLink4URL: https://datasheet.ciiva.com/10640/ds18015-10640311.pdf?src-supplier=Avnet; ComponentLink4Description: https://datasheet.ciiva.com/10640/ds18015-10640311.pdf?src-supplier=Avnet; Type: Стабилитрон
footprint DIOM519X260X240L114X145N (Diode, Molded Body; 4.315 mm L X 2.605 mm W X 2.20 mm H body)
pins: A, C

## SN74HC165DR
designator D?  (value not drawn)
8-Bit Parallel-Load Shift Registers; Type: Микросхема; Supplier 1: Digi-Key; Supplier 2: Digi-Key; Supplier 3: Digi-Key; Supplier 4: Digi-Key; Supplier 5: Arrow Electronics; Supplier Part Number 1: 296-8250-1-ND; Supplier Part Number 2: 296-8249-5-ND; Supplier Part Number 3: 296-31794-1-ND; Supplier Part Number 4: 296-SN74HC165DRG3CT-ND; Supplier Part Number 5: SN74HC165DRE4; Case/Package: SOIC-16; Mount: SMT; Value: 74HC165
footprint SOIC16P127_990X600X175L83X42N (Small Outline IC (SOIC), 1.27 mm pitch; 16 pin, 9.90 mm L X 3.90 mm W X 1.75 mm H body)
footprint SOIC16P127_990X600X175L65X42N (Small Outline IC (SOIC), 1.27 mm pitch; 16 pin, 9.90 mm L X 3.90 mm W X 1.75 mm H body)
pins: 1 SH/~{LD} (in) "Назначение вывода", 2 CLK (in) "Назначение вывода", 3 E (in) "Параллельный вход", 4 F (in) "Параллельный вход", 5 G (in) "Параллельный вход", 6 H (in) "Параллельный вход", 7 ~{QH} (out) "Комплементарный последовательный вывод", 8 GND (power), 9 QH (out) "Последовательный вывод", 10 SER (in) "Последовательный вход", 11 A (in) "Параллельный вход", 12 B (in) "Параллельный вход", 13 C (in) "Параллельный вход", 14 D (in) "Параллельный вход", 15 CLK INH (in) "Блокировка тактового входа", 16 VCC (power)
text: RG

## SN74HC573AQDWRQ1
designator D?  (value not drawn)
OCTAL TRANSPARENT D-TYPE LATCHES WITH 3-STATE OUTPUTS; Type: Микросхема; Supplier 1: Arrow; Supplier Part Number 1: SN74HC573AQDWRQ1; Case/Package: SOIC-20; Mount: SMT; Value: 74HC573
footprint SOIC20P127_1280X1031X265L83X41N (Small Outline IC (SOIC), 1.27 mm pitch; 20 pin, 12.80 mm L X 7.50 mm W X 2.65 mm H body)
pins: 1 ~{O}E (in) "Разрешение выхода", 2 1D (in) "Шина данных вход 1", 3 2D (in) "Шина данных вход 2", 4 3D (in) "Шина данных вход 3", 5 4D (in) "Шина данных вход 4", 6 5D (in) "Шина данных вход 5", 7 6D (in) "Шина данных вход 6", 8 7D (in) "Шина данных вход 7", 9 8D (in) "Шина данных вход 8", 10 GND (power), 11 LE (in) "Защелка выхода", 12 8Q (out) "Шина данных выход 8", 13 7Q (out) "Шина данных выход 7", 14 6Q (out) "Шина данных выход 6", 15 5Q (out) "Шина данных выход 5", 16 4Q (out) "Шина данных выход 4", 17 3Q (out) "Шина данных выход 3", 18 2Q (out) "Шина данных выход 2", 19 1Q (out) "Шина данных выход 1", 20 Vcc (power)
1 alternate drawing of the same symbol
text: RG

## SN74HC595D
designator D?  (value not drawn)
8-Bit Shift Registers With 3-State Output Registers; Manufacturer 1: Texas Instruments; Number of Bits: 8; Number of Elements: 1; Direction: Unidirectional; Operating Supply Voltage: 5V; Propagation Delay: 250ns; Max Supply Voltage: 6V; Min Supply Voltage: 2V; Number of Circuits: 4; Number of Output Lines: 10; Quiescent Current: 8uA; Type: Микросхема; Supplier 1: Digi-Key; Supplier Part Number 1: 296-8344-5-ND; Manufacturer Part Number 1: SN74HC595D; RoHS: Yes; Category: Shift Registers; Stock 1: 3670; Pricing 1: 1=0,70000, 10=0,61200, 25=0,57520, 100=0,46930, 250=0,43592, 500=0,37100, 1000=0,30625 (USD); Mount: SMT; Case/Package: SOIC-16; Number of Pins: 16; Weight: 0.004998oz; Contact Plating: Gold; Min Operating Temperature: -40°C; Max Operating Temperature: 85°C; Packaging: Rail/Tube; Logic Function: Shift Register; Package Quantity: 40; Number of Bits per Element: 8; Turn-On Delay Time: 250ns; Length: 9.9mm; Width: 3.91mm; Height: 1.58mm; Radiation Hardening: No; Lead Free: Lead Free; REACH SVHC: No SVHC; ComponentLink1URL: https://datasheet.ciiva.com/15093/getdatasheetpartid-83263-15093340.pdf?src-supplier=Verical; ComponentLink1Description: https://datasheet.ciiva.com/15093/getdatasheetpartid-83263-15093340.pdf?src-supplier=Verical; ComponentLink2URL: https://datasheet.ciiva.com/1886/sn74hc595-1886360.pdf?src-supplier=Digi-Key; ComponentLink2Description: https://datasheet.ciiva.com/1886/sn74hc595-1886360.pdf?src-supplier=Digi-Key; ComponentLink3URL: https://datasheet.ciiva.com/14294/sn74hc595-14294987.pdf?src-supplier=Avnet; ComponentLink3Description: https://datasheet.ciiva.com/14294/sn74hc595-14294987.pdf?src-supplier=Avnet; ComponentLink4URL: https://datasheet.ciiva.com/26259/sn74hc595-26259798.pdf?src-supplier=Avnet+Europe; ComponentLink4Description: https://datasheet.ciiva.com/26259/sn74hc595-26259798.pdf?src-supplier=Avnet+Europe; Value: 74HC595
footprint SOIC16P127_990X600X175L83X42N (Small Outline IC (SOIC), 1.27 mm pitch; 16 pin, 9.90 mm L X 3.90 mm W X 1.75 mm H body)
footprint SOIC16P127_990X600X175L65X42N (Small Outline IC (SOIC), 1.27 mm pitch; 16 pin, 9.90 mm L X 3.90 mm W X 1.75 mm H body)
pins: 1 QB (hiz), 2 QC (hiz), 3 QD (hiz), 4 QE (hiz), 5 QF (hiz), 6 QG (hiz), 7 QH (hiz), 8 GND (power), 9 QH' (hiz), 10 ~{SRCLR} (in), 11 SRCLK (in), 12 RCLK (in), 13 ~{OE} (in), 14 SER (in), 15 QA (hiz), 16 VCC (power)
1 alternate drawing of the same symbol
text: SRG8

## SN74HC595DR
designator D?  value 74HC595  (hidden comment: SN74HC595DR)
8-Bit Shift Registers With 3-State Output Registers; Manufacturer 1: Texas Instruments; Type: Микросхема; Direction: Unidirectional; Max Supply Voltage: 6V; Min Supply Voltage: 2V; Propagation Delay: 34ns; Number of Elements: 1; Number of Circuits: 4; Number of Bits: 8; Turn-On Delay Time: 250ns; Operating Supply Voltage: 5V; Number of Output Lines: 10; Quiescent Current: 8uA; Frequency: 42MHz; Max Input Current: 1uA; Case/Package: SOIC-16; Mount: SMT; Supplier 1: Rs; Supplier Part Number 1: 1218427; Manufacturer Part Number 1: SN74HC595DR; RoHS 1: Yes; Category: Shift Registers; Stock 1: 1125; Pricing 1: 2500=0,21500 (GBP); Number of Pins: 16; Weight: 0.004998oz; Contact Plating: Gold; Min Operating Temperature: -40°C; Max Operating Temperature: 85°C; Packaging: Tape and Reel; Package Quantity: 2500; Logic Function: Shift Register; Number of Bits per Element: 8; Series: 74HC; Technology: CMOS; Output Type: 3-STATE; Termination: SMD/SMT; Length: 9.9mm; Width: 3.91mm; Height: 1.58mm; Radiation Hardening: No; Lead Free: Lead Free; RoHS Compliant: Yes; Reach SVHC Compliant: Yes; ComponentLink1URL: https://datasheet.ciiva.com/22696/1831198-22696812.pdf?src-supplier=Element14; ComponentLink1Description: https://datasheet.ciiva.com/22696/1831198-22696812.pdf?src-supplier=Element14; ComponentLink2URL: https://datasheet.ciiva.com/34301/916385-34301758.pdf?src-supplier=Jameco; ComponentLink2Description: https://datasheet.ciiva.com/34301/916385-34301758.pdf?src-supplier=Jameco; ComponentLink3URL: https://datasheet.ciiva.com/15093/getdatasheetpartid-134875-15093436.pdf?src-supplier=Verical; ComponentLink3Description: https://datasheet.ciiva.com/15093/getdatasheetpartid-134875-15093436.pdf?src-supplier=Verical; ComponentLink4URL: https://datasheet.ciiva.com/1509/1831198-1509483.pdf?src-supplier=Element14; ComponentLink4Description: https://datasheet.ciiva.com/1509/1831198-1509483.pdf?src-supplier=Element14; ComponentLink5URL: https://datasheet.ciiva.com/46381/1886142-46381835.pdf?src-supplier=Element14; ComponentLink5Description: https://datasheet.ciiva.com/46381/1886142-46381835.pdf?src-supplier=Element14; ComponentLink6URL: https://datasheet.ciiva.com/46435/1831198-46435871.pdf?src-supplier=Element14; ComponentLink6Description: https://datasheet.ciiva.com/46435/1831198-46435871.pdf?src-supplier=Element14; ComponentLink7URL: https://datasheet.ciiva.com/1886/sn74hc595-1886280.pdf?src-supplier=Digi-Key; ComponentLink7Description: https://datasheet.ciiva.com/1886/sn74hc595-1886280.pdf?src-supplier=Digi-Key; ComponentLink8URL: https://datasheet.ciiva.com/1886/sn74hc595-1886279.pdf?src-supplier=Digi-Key; ComponentLink8Description: https://datasheet.ciiva.com/1886/sn74hc595-1886279.pdf?src-supplier=Digi-Key; ComponentLink9URL: https://datasheet.ciiva.com/1886/sn74hc595-1886281.pdf?src-supplier=Digi-Key; ComponentLink9Description: https://datasheet.ciiva.com/1886/sn74hc595-1886281.pdf?src-supplier=Digi-Key; ComponentLink10URL: https://datasheet.ciiva.com/14294/sn74hc595-14294991.pdf?src-supplier=Avnet; ComponentLink10Description: https://datasheet.ciiva.com/14294/sn74hc595-14294991.pdf?src-supplier=Avnet; ComponentLink11URL: https://datasheet.ciiva.com/14294/sn74hc595-14294989.pdf?src-supplier=Avnet; ComponentLink11Description: https://datasheet.ciiva.com/14294/sn74hc595-14294989.pdf?src-supplier=Avnet
footprint SOIC16P127_990X600X175L65X42N (Small Outline IC (SOIC), 1.27 mm pitch; 16 pin, 9.90 mm L X 3.90 mm W X 1.75 mm H body)
pins: 1 QB (out) "GND", 2 QС (out) "GND", 3 QD (out) "GND", 4 QE (out) "GND", 5 QF (out) "GND", 6 QG (out) "GND", 7 QH (out) "GND", 8 GND (power), 9 QH' (out) "GND", 10 ~{SRCLR} (in) "SRCLR Input", 11 SRCLK (in) "SRCLK Input", 12 RCLK (in) "RCLK Input", 13 ~{OE} (in) "Output Enable", 14 SER (in) "GND", 15 QA (out) "GND", 16 VCC (power) "Vcc"
text: SRG8

## SN74LVC1G14DBVR
designator D?  (value not drawn)
Single Schmitt-Trigger Inverter; Type: Микросхема; Supplier 1: Digi-Key; Supplier Part Number 1: 296-11607-1-ND; Case/Package: SOT-23-5; Mount: SMT; Value: SN74LVC1G14
footprint SOT23-5P95_280X145L45X40N (Small Outline Transistor (SOT23), 0.95 mm pitch; 5 pin, 2.90 mm L X 1.60 mm W X 1.45 mm H body)
pins: 2 A (in) "Входной сигнал", 3 GND (power), 4 Y (out) "Выходной сигнал", 5 VCC (power)
text: T

## SQM40041EL_GE3
designator V?  (value not drawn)
Trans MOSFET P-CH 40V 120A Automotive 3-Pin(2+Tab) D2PAK T/R; Manufacturer 1: Vishay Siliconix; Value: 40041; Manufacturer Part Number 1: SQM40041EL_GE3; RoHS: No; Stock 1: 249; Pricing 1: 1=3,56000, 10=3,21000, 25=3,03000, 50=2,81000, 100=2,60000, 250=2,53000 (USD); Supplier 1: Newark; Supplier 2: Mouser; Supplier 3: RSComponents; Supplier 4: Farnell; Supplier 5: Farnell; Supplier Part Number 1: 38AH5936; Supplier Part Number 2: 78-SQM40041EL_GE3; Supplier Part Number 3: 1884921; Supplier Part Number 4: 3104168; Supplier Part Number 5: 3104168RL; Supplier 6: Digi-Key; Manufacturer 6: Vishay Siliconix; Manufacturer Part Number 6: SQM40041EL_GE3; Pricing 6: 1=2,98000, 10=2,67400, 100=2,14950 (USD); Supplier Part Number 6: SQM40041EL_GE3CT-ND; Case/Package: TO-263; Mount: SMT; Type: Транзистор
footprint DPAK3P508_1524X482L179X74T741X1041M (D2PAK, 5.08 mm pitch; 3 pin, 9.015 mm L X 10.16 mm W X 4.83 mm H body)
pins: 1 G, 2 S, 3 D

## SQM50034E_GE3
designator V?  (value not drawn)
Manufacturer 1: Vishay; Value: 50034; Manufacturer Part Number 1: SQM50034E_GE3; RoHS: No; Stock 1: 35; Pricing 1: 1=2,35000, 10=2,11300, 100=1,69800 (USD); Supplier 1: Digi-Key; Supplier 2: Mouser; Supplier 3: Digi-Key; Supplier 4: Digi-Key; Supplier 5: Digi-Key; Supplier 6: Newark; Supplier 7: Avnet; Supplier 8: Farnell; Supplier 9: Farnell; Supplier 10: RSComponents; Supplier Part Number 1: SQM50034E_GE3CT-ND; Supplier Part Number 2: 78-SQM50034EL_GE3; Supplier Part Number 3: SQM50034EL_GE3DKR-ND; Supplier Part Number 4: SQM50034EL_GE3CT-ND; Supplier Part Number 5: SQM50034EL_GE3TR-ND; Supplier Part Number 6: 32AH6936; Supplier Part Number 7: SQM50034EL_GE3; Supplier Part Number 8: 3224963; Supplier Part Number 9: 3224963RL; Supplier Part Number 10: 2006789; Case/Package: TO-263; Mount: SMT; Type: Транзистор
footprint DPAK3P508_1524X482L179X74T741X1041M (D2PAK, 5.08 mm pitch; 3 pin, 9.015 mm L X 10.16 mm W X 4.83 mm H body)
pins: 1 G, 2 S, 3 D

## SRN8040-220M
designator L?  (value not drawn)
SMD Power Inductor 22uH ±20% 2.2A 100mOhm; Manufacturer 1: Bourns; Type: Катушка индуктивности; Core Material: Carbonyl Powder; Current Rating: 9A; Saturation Current: 12A; Shielding: Shielded; DC Resistance (DCR): 37mR; Self Resonant Frequency: 6MHz; Test Frequency: 100kHz; Material: Steel; Case/Package: SMD-2; Mount: SMT; Value: SRN8040; Manufacturer 2: Bourns; Manufacturer Part Number 2: SRP1265A-220M; RoHS 2: Yes; Category: Fixed Inductors; Stock 2: 2000; Pricing 2: 500=1,08, 2500=1,06, 5000=1,04 (EUR); Min Operating Temperature: -40°C; Max Operating Temperature: 150°C; Packaging: Cut Tape; Tolerance: 20%; Inductance: 22uH; Max DC Current: 9A; RMS Current (Irms): 9A; DC Current: 9A; Termination: SMD/SMT; Inductance Tolerance: 20%; Series: SRP1265A; Length: 0.531inch; Width: 0.492inch; Height: 6.2mm; Height - Seated (Max): 0.252inch; Depth: 12.8mm; Ratings: AEC-Q200; Reach SVHC Compliant: No; Military Standard: Not; RoHS Compliant: Yes; ComponentLink1URL: https://datasheet.ciiva.com/48685/srp1265a-48685099.pdf?src-supplier=Avnet; ComponentLink1Description: https://datasheet.ciiva.com/48685/srp1265a-48685099.pdf?src-supplier=Avnet; ComponentLink2URL: https://datasheet.ciiva.com/48685/srp1265a-48685101.pdf?src-supplier=Avnet; ComponentLink2Description: https://datasheet.ciiva.com/48685/srp1265a-48685101.pdf?src-supplier=Avnet; Supplier 1: Rs; Supplier Part Number 1: 7435188P; Manufacturer Part Number 1: SRN8040-220M; RoHS 1: Yes; Stock 1: 1840; Pricing 1: 10=103,317, 100=94,458, 500=78,783, 1000=56,974 (RUB); Number of Pins: 2; Package Quantity: 1000; Sample Rate (Hz): 100kHz; ComponentLink3URL: https://datasheet.ciiva.com/8513/srn8040-8513048.pdf?src-supplier=Avnet; ComponentLink3Description: https://datasheet.ciiva.com/8513/srn8040-8513048.pdf?src-supplier=Avnet; ComponentLink4URL: https://datasheet.ciiva.com/1062/srn8040-1062041.pdf?src-supplier=Digi-Key; ComponentLink4Description: https://datasheet.ciiva.com/1062/srn8040-1062041.pdf?src-supplier=Digi-Key; ComponentLink5URL: https://datasheet.ciiva.com/1062/srn8040-1062042.pdf?src-supplier=Digi-Key; ComponentLink5Description: https://datasheet.ciiva.com/1062/srn8040-1062042.pdf?src-supplier=Digi-Key; ComponentLink6URL: https://datasheet.ciiva.com/1062/srn8040-1062043.pdf?src-supplier=Digi-Key; ComponentLink6Description: https://datasheet.ciiva.com/1062/srn8040-1062043.pdf?src-supplier=Digi-Key; ComponentLink7URL: https://datasheet.ciiva.com/17111/70231668-17111999.pdf?src-supplier=Allied+Electronics; ComponentLink7Description: https://datasheet.ciiva.com/17111/70231668-17111999.pdf?src-supplier=Allied+Electronics
footprint BOURNS_SRN8040
pins: 1 "Назначение вывода", 2 "Назначение вывода"

## SRP1265A-220M
designator L?  (value not drawn)
SMD Power Inductor 22uH ±20% 9A 37mOhm; Type: Катушка индуктивности; Core Material: Carbonyl Powder; Saturation Current: 12A; Shielding: Shielded; DC Resistance (DCR): 37mR; Self Resonant Frequency: 6MHz; Test Frequency: 100kHz; Case/Package: SMD-2; Mount: SMT; Value: SRP1265A; Manufacturer 2: Bourns; Manufacturer Part Number 2: SRP1265A-220M; RoHS 2: Yes; Category: Fixed Inductors; Stock 2: 2000; Pricing 2: 500=1,08, 2500=1,06, 5000=1,04 (EUR); Min Operating Temperature: -40°C; Max Operating Temperature: 150°C; Packaging: Cut Tape; Tolerance: 20%; Inductance: 22uH; Current Rating: 9A; Max DC Current: 9A; RMS Current (Irms): 9A; DC Current: 9A; Termination: SMD/SMT; Inductance Tolerance: 20%; Series: SRP1265A; Length: 0.531inch; Width: 0.492inch; Height: 6.2mm; Height - Seated (Max): 0.252inch; Depth: 12.8mm; Ratings: AEC-Q200; Reach SVHC Compliant: No; Military Standard: Not; RoHS Compliant: Yes; ComponentLink1URL: https://datasheet.ciiva.com/48685/srp1265a-48685099.pdf?src-supplier=Avnet; ComponentLink1Description: https://datasheet.ciiva.com/48685/srp1265a-48685099.pdf?src-supplier=Avnet; ComponentLink2URL: https://datasheet.ciiva.com/48685/srp1265a-48685101.pdf?src-supplier=Avnet; ComponentLink2Description: https://datasheet.ciiva.com/48685/srp1265a-48685101.pdf?src-supplier=Avnet; Supplier 1: Farnell; Supplier Part Number 1: 2786999
footprint BOURNS_SRP1265A_1
pins: 1 "Назначение вывода", 2 "Назначение вывода"

## SRP1265A-330M
designator L?  (value not drawn)
SMD Power Inductor 33uH ±20% 8A 58mOhm; Type: Катушка индуктивности; Core Material: Carbonyl Powder; Inductance: 22uH; Current Rating: 9A; Saturation Current: 12A; Shielding: Shielded; DC Resistance (DCR): 37mR; Self Resonant Frequency: 6MHz; Test Frequency: 100kHz; Case/Package: SMD-2; Mount: SMT; Value: SRP1265A; Manufacturer 2: Bourns; Manufacturer Part Number 2: SRP1265A-220M; RoHS 2: Yes; Category: Fixed Inductors; Stock 2: 2000; Pricing 2: 500=1,08, 2500=1,06, 5000=1,04 (EUR); Min Operating Temperature: -40°C; Max Operating Temperature: 150°C; Packaging: Cut Tape; Tolerance: 20%; Max DC Current: 9A; RMS Current (Irms): 9A; DC Current: 9A; Termination: SMD/SMT; Inductance Tolerance: 20%; Series: SRP1265A; Length: 0.531inch; Width: 0.492inch; Height: 6.2mm; Height - Seated (Max): 0.252inch; Depth: 12.8mm; Ratings: AEC-Q200; Reach SVHC Compliant: No; Military Standard: Not; RoHS Compliant: Yes; ComponentLink1URL: https://datasheet.ciiva.com/48685/srp1265a-48685099.pdf?src-supplier=Avnet; ComponentLink1Description: https://datasheet.ciiva.com/48685/srp1265a-48685099.pdf?src-supplier=Avnet; ComponentLink2URL: https://datasheet.ciiva.com/48685/srp1265a-48685101.pdf?src-supplier=Avnet; ComponentLink2Description: https://datasheet.ciiva.com/48685/srp1265a-48685101.pdf?src-supplier=Avnet; Supplier 1: Farnell; Supplier Part Number 1: 2786999
footprint BOURNS_SRP1265A_1
pins: 1 "Назначение вывода", 2 "Назначение вывода"